# Altium footprint library Miscellaneous Devices.PcbLib: 306 footprints (part 7 of 20)
Each footprint in its own frame and in the unit in brackets; x right, y up, seen from the top. Pads: shape width x height; smd on the part's side, far side on the other; paste and mask are expansions set on the pad; w line width, h text height; cw(c..) or ccw(c..) is an arc to the next point about the centre after c.
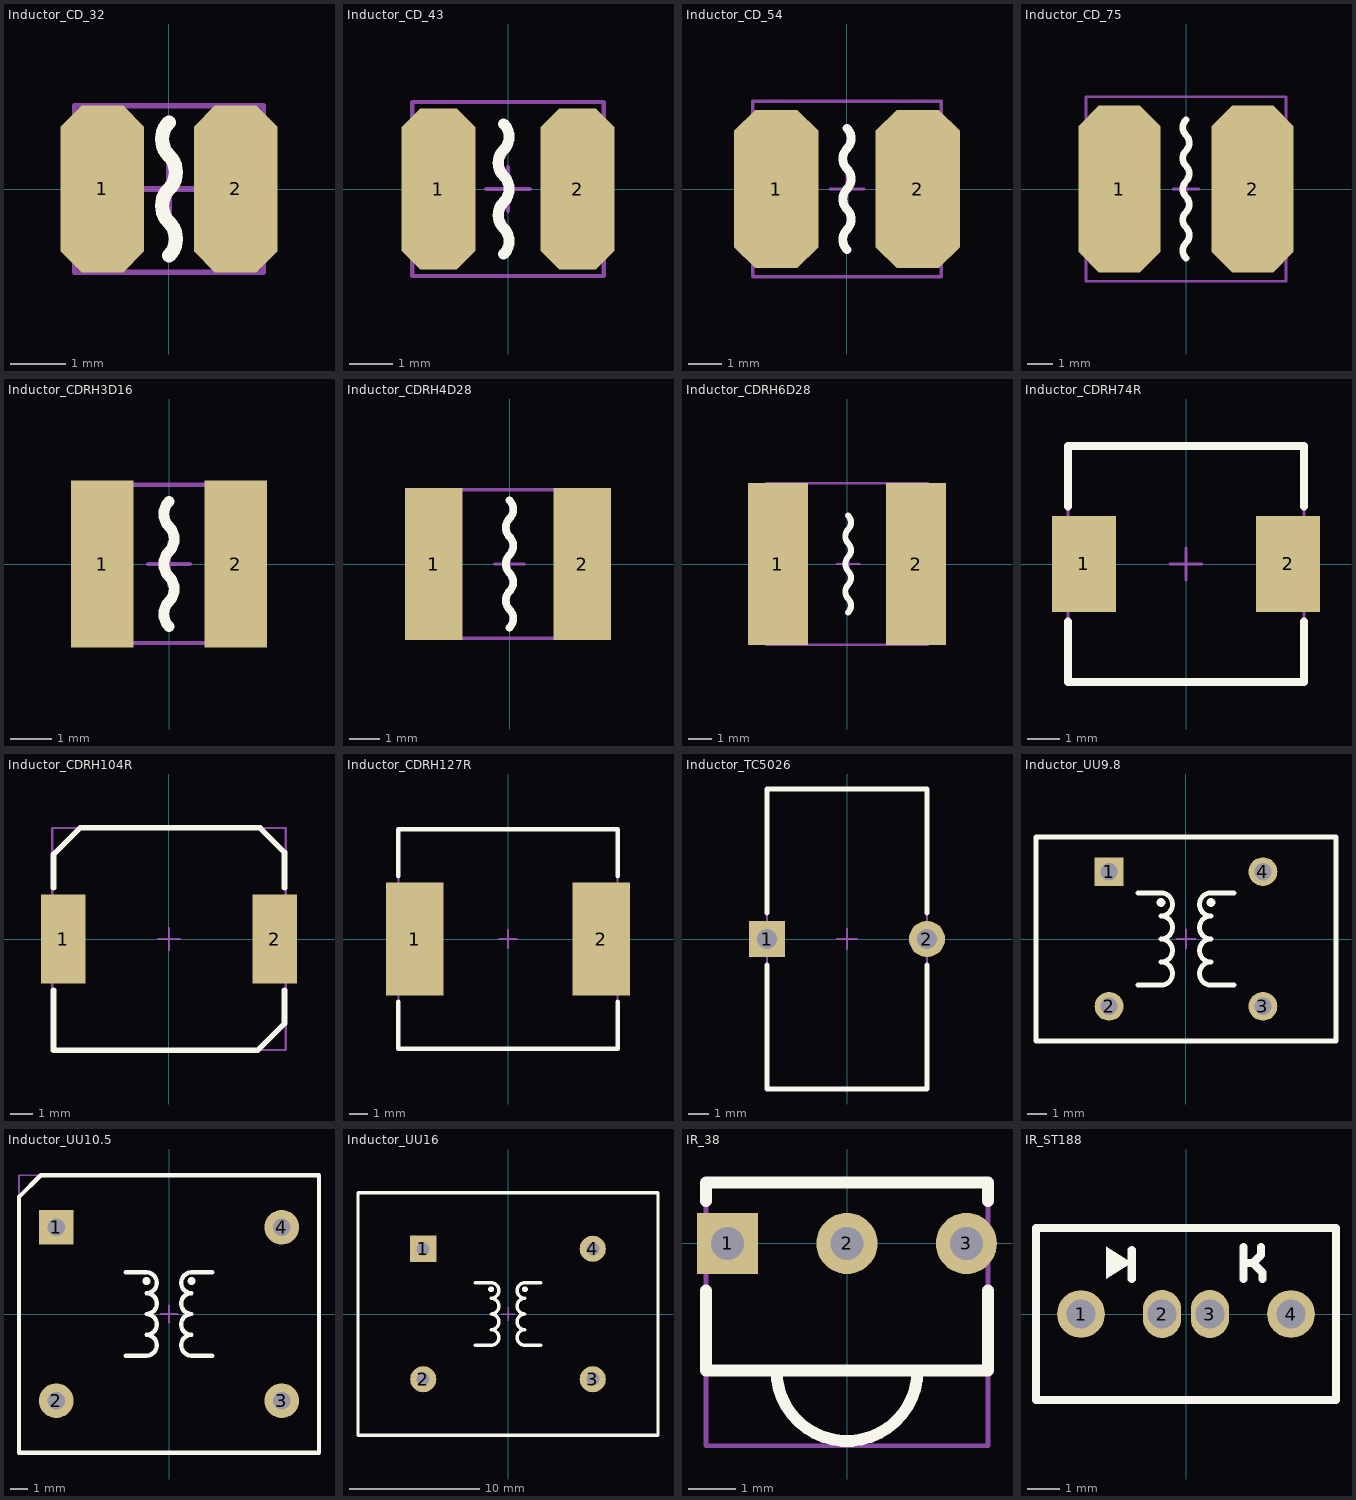
[diagram p6: the footprints below, top view; thin cyan lines are the x and y axes]

## Inductor_CD_32 [mm]
pads (2):
  oct 1.5x3 smd: 1(-1.2,0) 2(1.2,0)
Top Overlay:
  lines w0.254: 0,-1.2 ccw(c-0.3,-0.9) 0,-0.6 cw(c0.3,-0.3) 0,0 ccw(c-0.3,0.3) 0,0.6 cw(c0.3,0.9) 0,1.2
Mechanical 15:
  lines w0.1: -0.5,0 0.5,0 ; 0,-0.5 0,0.5 ; -1.7,-1.5 1.7,-1.5 1.7,1.5 -1.7,1.5 -1.7,-1.5
3D body: height 2.2, standoff 0, extent -1.789,-1.6 1.789,1.6

## Inductor_CD_43 [mm]
pads (2):
  oct 1.7x3.7 smd: 1(-1.6,0) 2(1.6,0)
Top Overlay:
  lines w0.254: -0.1,-1.5 ccw(c-0.4,-1.2) -0.1,-0.9 cw(c0.2,-0.6) -0.1,-0.3 ccw(c-0.4,0) -0.1,0.3 cw(c0.2,0.6) -0.1,0.9 ccw(c-0.4,1.2) -0.1,1.5
Mechanical 15:
  lines w0.1: -0.5,0 0.5,0 ; 0,-0.5 0,0.5 ; -2.2,-2 2.2,-2 2.2,2 -2.2,2 -2.2,-2
3D body: height 3.25, standoff 0, extent -2.201,-2 2.201,2

## Inductor_CD_54 [mm]
pads (2):
  oct 2.5x4.7 smd: 1(-2.1,0) 2(2.1,0)
Top Overlay:
  lines w0.254: 0,-1.8 cw(c0.3,-1.5) 0,-1.2 ccw(c-0.3,-0.9) 0,-0.6 cw(c0.3,-0.3) 0,0 ccw(c-0.3,0.3) 0,0.6 cw(c0.3,0.9) 0,1.2 ccw(c-0.3,1.5) 0,1.8
Mechanical 15:
  lines w0.1: -0.5,0 0.5,0 ; 0,-0.5 0,0.5 ; -2.8,-2.6 -2.8,2.6 2.8,2.6 2.8,-2.6 -2.8,-2.6
3D body: height 4.55, standoff 0, extent -2.754,-2.6 2.754,2.6

## Inductor_CD_75 [mm]
pads (2):
  oct 3.2x6.5 smd: 1(-2.6,0) 2(2.6,0)
Top Overlay:
  lines w0.254: 0,-2.7 cw(c0.3,-2.4) 0,-2.1 ccw(c-0.3,-1.8) 0,-1.5 cw(c0.3,-1.2) 0,-0.9 ccw(c-0.3,-0.6) 0,-0.3 cw(c0.3,0) 0,0.3 ccw(c-0.3,0.6) 0,0.9 cw(c0.3,1.2) 0,1.5 ccw(c-0.3,1.8) 0,2.1 cw(c0.3,2.4) 0,2.7
Mechanical 15:
  lines w0.1: -0.5,0 0.5,0 ; 0,-0.5 0,0.5 ; -3.9,-3.6 3.9,-3.6 3.9,3.6 -3.9,3.6 -3.9,-3.6
3D body: height 5.05, standoff 0, extent -3.827,-3.5 3.827,3.5

## Inductor_CDRH3D16 [mm]
pads (2):
  rect 1.5x4 smd: 1(-1.6,0) 2(1.6,0)
Top Overlay:
  lines w0.254: 0,-1.5 cw(c0.3,-1.2) 0,-0.9 ccw(c-0.3,-0.6) 0,-0.3 cw(c0.3,0) 0,0.3 ccw(c-0.3,0.6) 0,0.9 cw(c0.3,1.2) 0,1.5
Mechanical 15:
  lines w0.1: -0.5,0 0.5,0 ; 0,-0.5 0,0.5 ; -1.9,-1.9 -1.9,1.9 1.9,1.9 1.9,-1.9 -1.9,-1.9
3D body: height 2, standoff 0, extent -2.02,-2 2.02,2.04

## Inductor_CDRH4D28 [mm]
pads (2):
  rect 1.9x5 smd: 1(-2.5,0) 2(2.4,0)
Top Overlay:
  lines w0.254: 0,-2.1 ccw(c-0.3,-1.8) 0,-1.5 cw(c0.3,-1.2) 0,-0.9 ccw(c-0.3,-0.6) 0,-0.3 cw(c0.3,0) 0,0.3 ccw(c-0.3,0.6) 0,0.9 cw(c0.3,1.2) 0,1.5 ccw(c-0.3,1.8) 0,2.1
Mechanical 15:
  lines w0.1: -0.5,0 0.5,0 ; 0,-0.5 0,0.5 ; -2.45,-2.45 2.45,-2.45 2.45,2.45 -2.45,2.45 -2.45,-2.45
3D body: height 2.91, standoff 0, extent -2.45,-2.45 2.45,2.45

## Inductor_CDRH6D28 [mm]
pads (2):
  rect 2.6x7 smd: 1(-3,0) 2(3,0)
Top Overlay:
  lines w0.254: 0.05,-2.1 ccw(c-0.25,-1.8) 0.05,-1.5 cw(c0.35,-1.2) 0.05,-0.9 ccw(c-0.25,-0.6) 0.05,-0.3 cw(c0.35,0) 0.05,0.3 ccw(c-0.25,0.6) 0.05,0.9 cw(c0.35,1.2) 0.05,1.5 ccw(c-0.25,1.8) 0.05,2.1
Mechanical 15:
  lines w0.1: -0.45,0 0.55,0 ; 0.05,-0.5 0.05,0.5 ; -3.5,-3.5 3.5,-3.5 3.5,3.5 -3.5,3.5 -3.5,-3.5
3D body: height 2.9, standoff 0, extent -3.35,-3.36 3.35,3.34

## Inductor_CDRH74R [mm]
pads (2):
  rect 2x3 smd: 1(-3.2,0) 2(3.2,0)
Top Overlay:
  lines w0.254: -3.7,-1.8 -3.7,-3.7 3.7,-3.7 3.7,-1.8 ; -3.7,1.8 -3.7,3.7 3.7,3.7 3.7,1.8
Mechanical 15:
  lines w0.1: -0.5,0 0.5,0 ; 0,-0.5 0,0.5 ; -3.7,-3.7 3.7,-3.7 3.7,3.7 -3.7,3.7 -3.7,-3.7
3D body: height 4.5, standoff 0, extent -4,-3.7 4,3.7

## Inductor_CDRH104R [mm]
pads (2):
  rect 2x4 smd: 1(-4.75,0) 2(4.75,0)
Top Overlay:
  lines w0.254: -5.2,-2.3 -5.2,-5 4,-5 5.2,-3.8 5.2,-2.3 ; -5.2,2.3 -5.2,3.8 -4,5 4.1,5 5.2,3.9 5.2,2.3
Mechanical 15:
  lines w0.1: -0.5,0 0.5,0 ; 0,-0.5 0,0.5 ; -5.25,-5 5.25,-5 5.25,5 -5.25,5 -5.25,-5
3D body: height 4, standoff 0, extent -5.25,-5.15 5.25,5.15

## Inductor_CDRH127R [mm]
pads (2):
  rect 3.2x6.3 smd: 1(-5.2,0) 2(5.2,0)
Top Overlay:
  lines w0.254: -6.1,-3.5 -6.1,-6.1 6.1,-6.1 6.1,-3.5 ; -6.1,3.5 -6.1,6.1 6.1,6.1 6.1,3.5
Mechanical 15:
  lines w0.1: -0.5,0 0.5,0 ; 0,-0.5 0,0.5 ; -6.1,-6.1 6.1,-6.1 6.1,6.1 -6.1,6.1 -6.1,-6.1
3D body: height 6.8, standoff 0.1, extent -6.25,-6.3 6.25,6.2

## Inductor_TC5026 [mm]
pads (2):
  rect 1.8x1.8 hole 1: 1(-4,0)
  round 1.8 hole 1: 2(4,0)
Top Overlay:
  lines w0.254: -4,-1.3 -4,-7.5 4,-7.5 4,-1.3 ; -4,1.3 -4,7.5 4,7.5 4,1.3
Mechanical 15:
  lines w0.1: -0.5,0 0.5,0 ; 0,-0.5 0,0.5 ; -4,-7.5 4,-7.5 4,7.5 -4,7.5 -4,-7.5
3D body: height 17.2, standoff -2.18, extent -4,-7.2 4.1,7.2

## Inductor_UU9.8 [mm]
pads (4):
  rect 1.5x1.5 hole 0.9: 1(-4,3.5)
  round 1.5 hole 0.9: 2(-4,-3.5) 3(4,-3.5) 4(4,3.5)
Top Overlay:
  circle w0.254: c1.3,1.9 r0.1
  circle w0.254: c-1.3,1.9 r0.1
  lines w0.254: -2.5,-2.4 -1.3,-2.4 ccw(c-1.3,-1.8) -1.3,-1.2 ccw(c-1.3,-0.6) -1.3,0 ccw(c-1.3,0.6) -1.3,1.2 ccw(c-1.3,1.8) -1.3,2.4 -2.5,2.4 ; 2.5,-2.4 1.3,-2.4 cw(c1.3,-1.8) 1.3,-1.2 cw(c1.3,-0.6) 1.3,0 cw(c1.3,0.6) 1.3,1.2 cw(c1.3,1.8) 1.3,2.4 2.5,2.4 ; -7.8,-5.3 -7.8,5.3 7.8,5.3 7.8,-5.3 -7.8,-5.3
Mechanical 15:
  lines w0.1: -0.5,0 0.5,0 ; 0,-0.5 0,0.5 ; -7.8,-5.3 7.8,-5.3 7.8,5.3 -7.8,5.3 -7.8,-5.3

## Inductor_UU10.5 [mm]
pads (4):
  rect 2x2 hole 1: 1(-6.5,5)
  round 2 hole 1: 2(-6.5,-5) 3(6.5,-5) 4(6.5,5)
Top Overlay:
  circle w0.254: c-1.3,1.9 r0.1
  circle w0.254: c1.3,1.9 r0.1
  lines w0.254: -2.5,-2.4 -1.3,-2.4 ccw(c-1.3,-1.8) -1.3,-1.2 ccw(c-1.3,-0.6) -1.3,0 ccw(c-1.3,0.6) -1.3,1.2 ccw(c-1.3,1.8) -1.3,2.4 -2.5,2.4 ; 2.5,-2.4 1.3,-2.4 cw(c1.3,-1.8) 1.3,-1.2 cw(c1.3,-0.6) 1.3,0 cw(c1.3,0.6) 1.3,1.2 cw(c1.3,1.8) 1.3,2.4 2.5,2.4 ; -8.65,-8 8.65,-8 8.65,8 -7.4,8 -8.65,6.75 -8.65,-8
Mechanical 15:
  lines w0.1: -0.5,0 0.5,0 ; 0,-0.5 0,0.5 ; -8.65,-8 -8.65,8 8.65,8 8.65,-8 -8.65,-8
3D body: height 24.48, standoff -1.5, extent -10.897,-8 10.897,8

## Inductor_UU16 [mm]
pads (4):
  rect 2x2 hole 1: 1(-6.5,5)
  round 2 hole 1: 2(-6.5,-5) 3(6.5,-5) 4(6.5,5)
Top Overlay:
  circle w0.254: c-1.3,1.9 r0.1
  circle w0.254: c1.3,1.9 r0.1
  lines w0.254: -2.5,-2.4 -1.3,-2.4 ccw(c-1.3,-1.8) -1.3,-1.2 ccw(c-1.3,-0.6) -1.3,0 ccw(c-1.3,0.6) -1.3,1.2 ccw(c-1.3,1.8) -1.3,2.4 -2.5,2.4 ; 2.5,-2.4 1.3,-2.4 cw(c1.3,-1.8) 1.3,-1.2 cw(c1.3,-0.6) 1.3,0 cw(c1.3,0.6) 1.3,1.2 cw(c1.3,1.8) 1.3,2.4 2.5,2.4 ; -11.5,-9.3 11.5,-9.3 11.5,9.3 -11.5,9.3 -11.5,-9.3
Mechanical 15:
  lines w0.1: -0.5,0 0.5,0 ; 0,-0.5 0,0.5 ; -11.5,-9.3 -11.5,9.3 11.5,9.3 11.5,-9.3 -11.5,-9.3
3D body: height 25.85, standoff -3.5, extent -11.134,-9.4 11.1,9.3

## IR_38 [mm]
pads (3):
  rect 1.3x1.3 hole 0.7: 1(-2.54,0)
  round 1.3 hole 0.7: 2(0,0) 3(2.54,0)
Top Overlay:
  lines w0.254: -3,-1 -3,-2.7 3,-2.7 3,-1 ; -3,0.9 -3,1.3 3,1.3 3,0.9 ; -1.5,-2.7 ccw(c0,-2.7) 1.5,-2.7
Mechanical 15:
  lines w0.1: -3,-2.7 -3,1.3 3,1.3 3,-2.7 ; -3,-2.7 3,-2.7 ; -3,-2.7 -3,-4.3 3,-4.3 3,-2.7
3D body: height 9.25, standoff 2.3, extent -3,-2.7 3,1.3
3D body: height 9, standoff 4, extent -2.487,-4.3 2.487,0.679
3D body: height 2.5, standoff -1.5, extent -0.248,-0.25 0.25,0.25
3D body: height 2.5, standoff -1.5, extent -2.798,-0.25 -2.3,0.25
3D body: height 2.5, standoff -1.5, extent 2.292,-0.25 2.79,0.25

## IR_ST188 [mm]
pads (4):
  round 1.5 hole 0.9: 1(-3.29,0) 4(3.29,0)
  oval 1.2x1.5 hole 0.9: 2(-0.75,0) 3(0.75,0)
Top Overlay:
  region: -1.7,1.6 -2.5,2.1 -2.5,1.1
  lines w0.254: -1.7,1.1 -1.7,2 ; 1.8,1.1 1.8,2.1 ; 1.8,1.6 2.1,1.6 ; 2.35,2.1 2.35,1.85 2.1,1.6 ; 2.4,1.1 2.4,1.3 2.1,1.6 ; -4.7,-2.7 -4.7,2.7 4.7,2.7 4.7,-2.7 -4.7,-2.7
Mechanical 15:
  lines w0.1: -4.7,-2.7 4.7,-2.7 4.7,2.7 -4.7,2.7 -4.7,-2.7
3D body: height 0, standoff -2, extent -3.54,-0.25 -3.042,0.249
3D body: height 0, standoff -2, extent 0.51,-0.25 1.008,0.25
3D body: height 0, standoff -2, extent 3.041,-0.26 3.539,0.239
3D body: height 0, standoff -2, extent -0.999,-0.25 -0.501,0.249
3D body: height 3.4, standoff 0, extent -3.5,-2.7 3.5,-2.4
3D body: height 3.4, standoff 0, extent -3.5,2.4 3.5,2.7
3D body: height 8.2, standoff 8, extent -3.096,-1.1 -0.904,1.096
3D body: height 8.2, standoff 8, extent 0.904,-1.1 3.096,1.096
3D body: height 8.15, standoff 0, extent -4.7,-2.7 4.7,2.7